# EAGLE library part IC_UC_STM32F103VX (library dp_devices.v6)
STM32F103Vx Medium-density performance line ARM-based 32-bit MCU
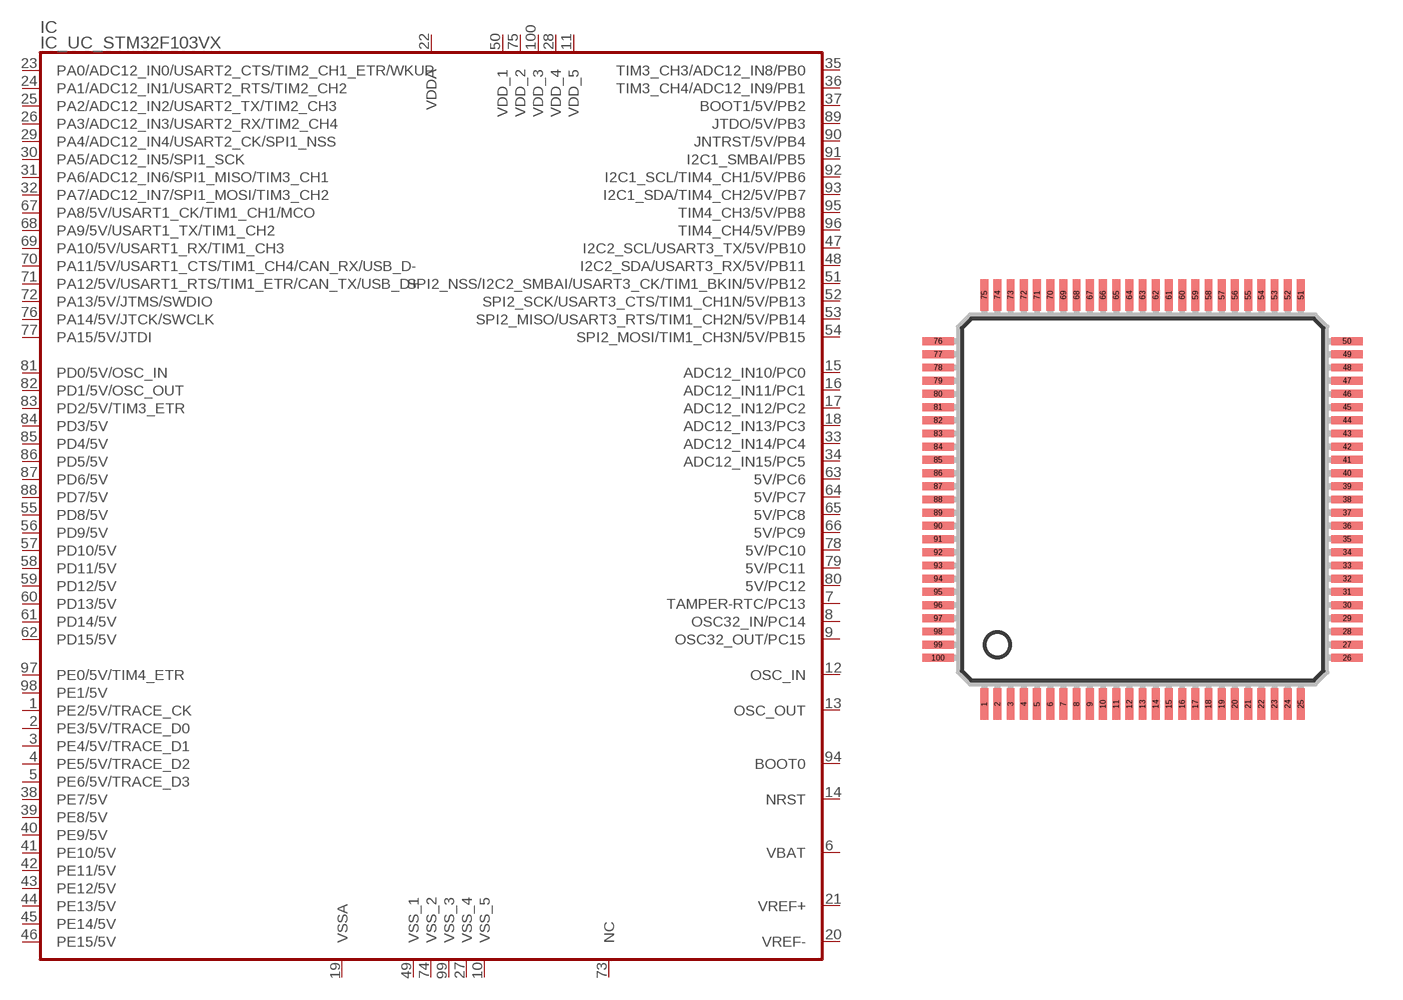
[diagram p185: symbol with the pads of LQFP-100; footprint LQFP-100]

Designator prefix IC

## IC_UC_STM32F103VX  [LQFP-100]
1  PE2/5V/TRACE_CK
2  PE3/5V/TRACE_D0
3  PE4/5V/TRACE_D1
4  PE5/5V/TRACE_D2
5  PE6/5V/TRACE_D3
6  VBAT  sup
7  TAMPER-RTC/PC13
8  OSC32_IN/PC14
9  OSC32_OUT/PC15
10  VSS_5  sup
11  VDD_5  sup
12  OSC_IN  in
13  OSC_OUT  out
14  NRST
15  ADC12_IN10/PC0
16  ADC12_IN11/PC1
17  ADC12_IN12/PC2
18  ADC12_IN13/PC3
19  VSSA  sup
20  VREF-  sup
21  VREF+  sup
22  VDDA  sup
23  PA0/ADC12_IN0/USART2_CTS/TIM2_CH1_ETR/WKUP
24  PA1/ADC12_IN1/USART2_RTS/TIM2_CH2
25  PA2/ADC12_IN2/USART2_TX/TIM2_CH3
26  PA3/ADC12_IN3/USART2_RX/TIM2_CH4
27  VSS_4  sup
28  VDD_4  sup
29  PA4/ADC12_IN4/USART2_CK/SPI1_NSS
30  PA5/ADC12_IN5/SPI1_SCK
31  PA6/ADC12_IN6/SPI1_MISO/TIM3_CH1
32  PA7/ADC12_IN7/SPI1_MOSI/TIM3_CH2
33  ADC12_IN14/PC4
34  ADC12_IN15/PC5
35  TIM3_CH3/ADC12_IN8/PB0
36  TIM3_CH4/ADC12_IN9/PB1
37  BOOT1/5V/PB2
38  PE7/5V
39  PE8/5V
40  PE9/5V
41  PE10/5V
42  PE11/5V
43  PE12/5V
44  PE13/5V
45  PE14/5V
46  PE15/5V
47  I2C2_SCL/USART3_TX/5V/PB10
48  I2C2_SDA/USART3_RX/5V/PB11
49  VSS_1  sup
50  VDD_1  sup
51  SPI2_NSS/I2C2_SMBAI/USART3_CK/TIM1_BKIN/5V/PB12
52  SPI2_SCK/USART3_CTS/TIM1_CH1N/5V/PB13
53  SPI2_MISO/USART3_RTS/TIM1_CH2N/5V/PB14
54  SPI2_MOSI/TIM1_CH3N/5V/PB15
55  PD8/5V
56  PD9/5V
57  PD10/5V
58  PD11/5V
59  PD12/5V
60  PD13/5V
61  PD14/5V
62  PD15/5V
63  5V/PC6
64  5V/PC7
65  5V/PC8
66  5V/PC9
67  PA8/5V/USART1_CK/TIM1_CH1/MCO
68  PA9/5V/USART1_TX/TIM1_CH2
69  PA10/5V/USART1_RX/TIM1_CH3
70  PA11/5V/USART1_CTS/TIM1_CH4/CAN_RX/USB_D-
71  PA12/5V/USART1_RTS/TIM1_ETR/CAN_TX/USB_D+
72  PA13/5V/JTMS/SWDIO
73  NC  pas
74  VSS_2  sup
75  VDD_2  sup
76  PA14/5V/JTCK/SWCLK
77  PA15/5V/JTDI
78  5V/PC10
79  5V/PC11
80  5V/PC12
81  PD0/5V/OSC_IN
82  PD1/5V/OSC_OUT
83  PD2/5V/TIM3_ETR
84  PD3/5V
85  PD4/5V
86  PD5/5V
87  PD6/5V
88  PD7/5V
89  JTDO/5V/PB3
90  JNTRST/5V/PB4
91  I2C1_SMBAI/PB5
92  I2C1_SCL/TIM4_CH1/5V/PB6
93  I2C1_SDA/TIM4_CH2/5V/PB7
94  BOOT0  in
95  TIM4_CH3/5V/PB8
96  TIM4_CH4/5V/PB9
97  PE0/5V/TIM4_ETR
98  PE1/5V
99  VSS_3  sup
100  VDD_3  sup

## Footprint LQFP-100 (pad centres in mm)
Low-profile quad flat pack 100 pin pitch 0.5mm solder mask ratio: 20% of pad width
smd 0.3 x 1.2: 1 -6,-7.75; 2 -5.5,-7.75; 3 -5,-7.75; 4 -4.5,-7.75; 5 -4,-7.75; 6 -3.5,-7.75; 7 -3,-7.75; 8 -2.5,-7.75; 9 -2,-7.75; 10 -1.5,-7.75; 11 -1,-7.75; 12 -0.5,-7.75; 13 0,-7.75; 14 0.5,-7.75; 15 1,-7.75; 16 1.5,-7.75; 17 2,-7.75; 18 2.5,-7.75; 19 3,-7.75; 20 3.5,-7.75; 21 4,-7.75; 22 4.5,-7.75; 23 5,-7.75; 24 5.5,-7.75; 25 6,-7.75; 51 6,7.75; 52 5.5,7.75; 53 5,7.75; 54 4.5,7.75; 55 4,7.75; 56 3.5,7.75; 57 3,7.75; 58 2.5,7.75; 59 2,7.75; 60 1.5,7.75; 61 1,7.75; 62 0.5,7.75; 63 0,7.75; 64 -0.5,7.75; 65 -1,7.75; 66 -1.5,7.75; 67 -2,7.75; 68 -2.5,7.75; 69 -3,7.75; 70 -3.5,7.75; 71 -4,7.75; 72 -4.5,7.75; 73 -5,7.75; 74 -5.5,7.75; 75 -6,7.75
smd 1.2 x 0.3: 26 7.75,-6; 27 7.75,-5.5; 28 7.75,-5; 29 7.75,-4.5; 30 7.75,-4; 31 7.75,-3.5; 32 7.75,-3; 33 7.75,-2.5; 34 7.75,-2; 35 7.75,-1.5; 36 7.75,-1; 37 7.75,-0.5; 38 7.75,0; 39 7.75,0.5; 40 7.75,1; 41 7.75,1.5; 42 7.75,2; 43 7.75,2.5; 44 7.75,3; 45 7.75,3.5; 46 7.75,4; 47 7.75,4.5; 48 7.75,5; 49 7.75,5.5; 50 7.75,6; 76 -7.75,6; 77 -7.75,5.5; 78 -7.75,5; 79 -7.75,4.5; 80 -7.75,4; 81 -7.75,3.5; 82 -7.75,3; 83 -7.75,2.5; 84 -7.75,2; 85 -7.75,1.5; 86 -7.75,1; 87 -7.75,0.5; 88 -7.75,0; 89 -7.75,-0.5; 90 -7.75,-1; 91 -7.75,-1.5; 92 -7.75,-2; 93 -7.75,-2.5; 94 -7.75,-3; 95 -7.75,-3.5; 96 -7.75,-4; 97 -7.75,-4.5; 98 -7.75,-5; 99 -7.75,-5.5; 100 -7.75,-6